# Altium integrated library AA1206JR-07470RL.IntLib: 1 symbol
Pins are listed as number, name and electrical type; pins without a type are passive.

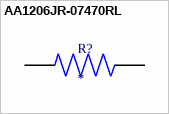
[diagram p0: symbol AA1206JR-07470RL]

## AA1206JR-07470RL
designator R?
470 Ohms Â±5% 0.25W, 1/4W Chip Resistor 1206 (3216 Metric) Anti-Sulfur, Automotive AEC-Q200, Moisture Resistant Thick Film; MF: Yageo; MP: AA1206JR-07470RL; SnapEDA_Link: https://www.snapeda.com/parts/AA1206JR-07470RL/Yageo/view-part/?ref=snap; Package: SMD-2 Yageo; Value: *; Check_prices: https://www.snapeda.com/parts/AA1206JR-07470RL/Yageo/view-part/?ref=eda
footprint RESC3116X65N
pins: 1, 2